# Altium schematic symbol library P70-2200045.SchLib: 1 symbol
Pins are listed as number, name and electrical type; pins without a type are passive.

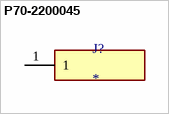
[diagram p0: symbol P70-2200045]

## P70-2200045
designator J?
MP: P70-2200045; Package: None; Price: None; Value: *; Availability: Unavailable
footprint HARWIN_P70-2200045
pins: 1